# Altium footprint library ARDUINO_ARDUINO_MEGA_2560_REV3_A000067.PcbLib: 1 footprints
Each footprint in its own frame and in the unit in brackets; x right, y up, seen from the top. Pads: shape width x height; smd on the part's side, far side on the other; paste and mask are expansions set on the pad; w line width, h text height; cw(c..) or ccw(c..) is an arc to the next point about the centre after c.
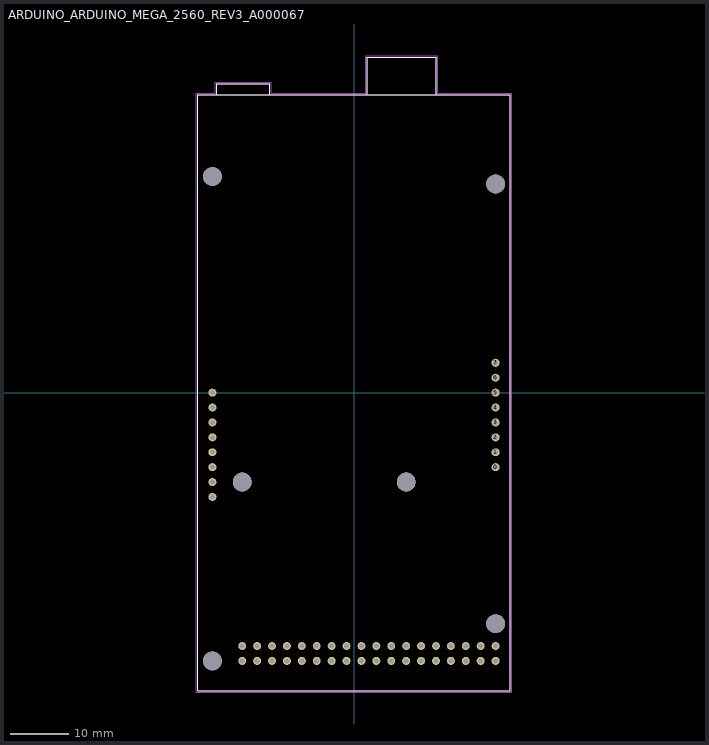
[diagram p0: the footprint, top view; thin cyan lines are the x and y axes]

## ARDUINO_ARDUINO_MEGA_2560_REV3_A000067 [mm]
pads (58):
  round 1.358 hole 0.85 mask+0.102: 0(24.13,-12.7) 1(24.13,-10.16) 2(24.13,-7.62) 3(24.13,-5.08) 4(24.13,-2.54) 5(24.13,0) 5V_2(24.13,-43.18) 5V_3(24.13,-45.72) 6(24.13,2.54) 7(24.13,5.08) 22(21.59,-43.18) 23(21.59,-45.72) 24(19.05,-43.18) 25(19.05,-45.72) 26(16.51,-43.18) 27(16.51,-45.72) 28(13.97,-43.18) 29(13.97,-45.72) 30(11.43,-43.18) 31(11.43,-45.72) 32(8.89,-43.18) 33(8.89,-45.72) 34(6.35,-43.18) 35(6.35,-45.72) 36(3.81,-43.18) 37(3.81,-45.72) 38(1.27,-43.18) 39(1.27,-45.72) 40(-1.27,-43.18) 41(-1.27,-45.72) 42(-3.81,-43.18) 43(-3.81,-45.72) 44(-6.35,-43.18) 45(-6.35,-45.72) 46(-8.89,-43.18) 47(-8.89,-45.72) 48(-11.43,-43.18) 49(-11.43,-45.72) 50(-13.97,-43.18) 51(-13.97,-45.72) 52(-16.51,-43.18) 53(-16.51,-45.72) AD0(-24.13,0) AD1(-24.13,-2.54) AD2(-24.13,-5.08) AD3(-24.13,-7.62) AD4(-24.13,-10.16) AD5(-24.13,-12.7) AD6(-24.13,-15.24) AD7(-24.13,-17.78) GND4(-19.05,-43.18) GND5(-19.05,-45.72)
  round 3.2 hole 3.2 unplated mask+0: ""(-24.13,-45.72) ""(-24.13,36.83) ""(-19.05,-15.24) ""(8.89,-15.24) ""(24.13,-39.37) ""(24.13,35.56)
Top Overlay:
  lines w0.127: -23.37,50.8 -26.67,50.8 -26.67,-50.8 26.67,-50.8 26.67,50.8 14.02,50.8 ; -23.37,50.8 -14.378,50.8 ; -23.37,50.8 -23.37,52.61 -14.378,52.61 -14.378,50.8 ; -14.378,50.8 2.22,50.8 ; 2.22,50.8 14.02,50.8 ; 2.22,50.8 2.22,57.15 14.02,57.15 14.02,50.8
Assembly Top:
  lines w0.127: -23.37,50.8 -26.67,50.8 -26.67,-50.8 26.67,-50.8 26.67,50.8 14.02,50.8 ; -23.37,50.8 -14.378,50.8 ; -23.37,50.8 -23.37,52.61 -14.378,52.61 -14.378,50.8 ; -14.378,50.8 2.22,50.8 ; 2.22,50.8 14.02,50.8 ; 2.22,50.8 2.22,57.15 14.02,57.15 14.02,50.8
Courtyard Top:
  lines w0.05: -26.92,-51.05 26.92,-51.05 26.92,51.05 14.27,51.05 14.27,57.4 1.97,57.4 1.97,51.05 -14.128,51.05 -14.128,52.86 -23.62,52.86 -23.62,51.05 -26.92,51.05 -26.92,-51.05